# Altium footprint library PcbLib1.PcbLib: 335 footprints (part 10 of 22)
Each footprint in its own frame and in the unit in brackets; x right, y up, seen from the top. Pads: shape width x height; smd on the part's side, far side on the other; paste and mask are expansions set on the pad; w line width, h text height; cw(c..) or ccw(c..) is an arc to the next point about the centre after c.
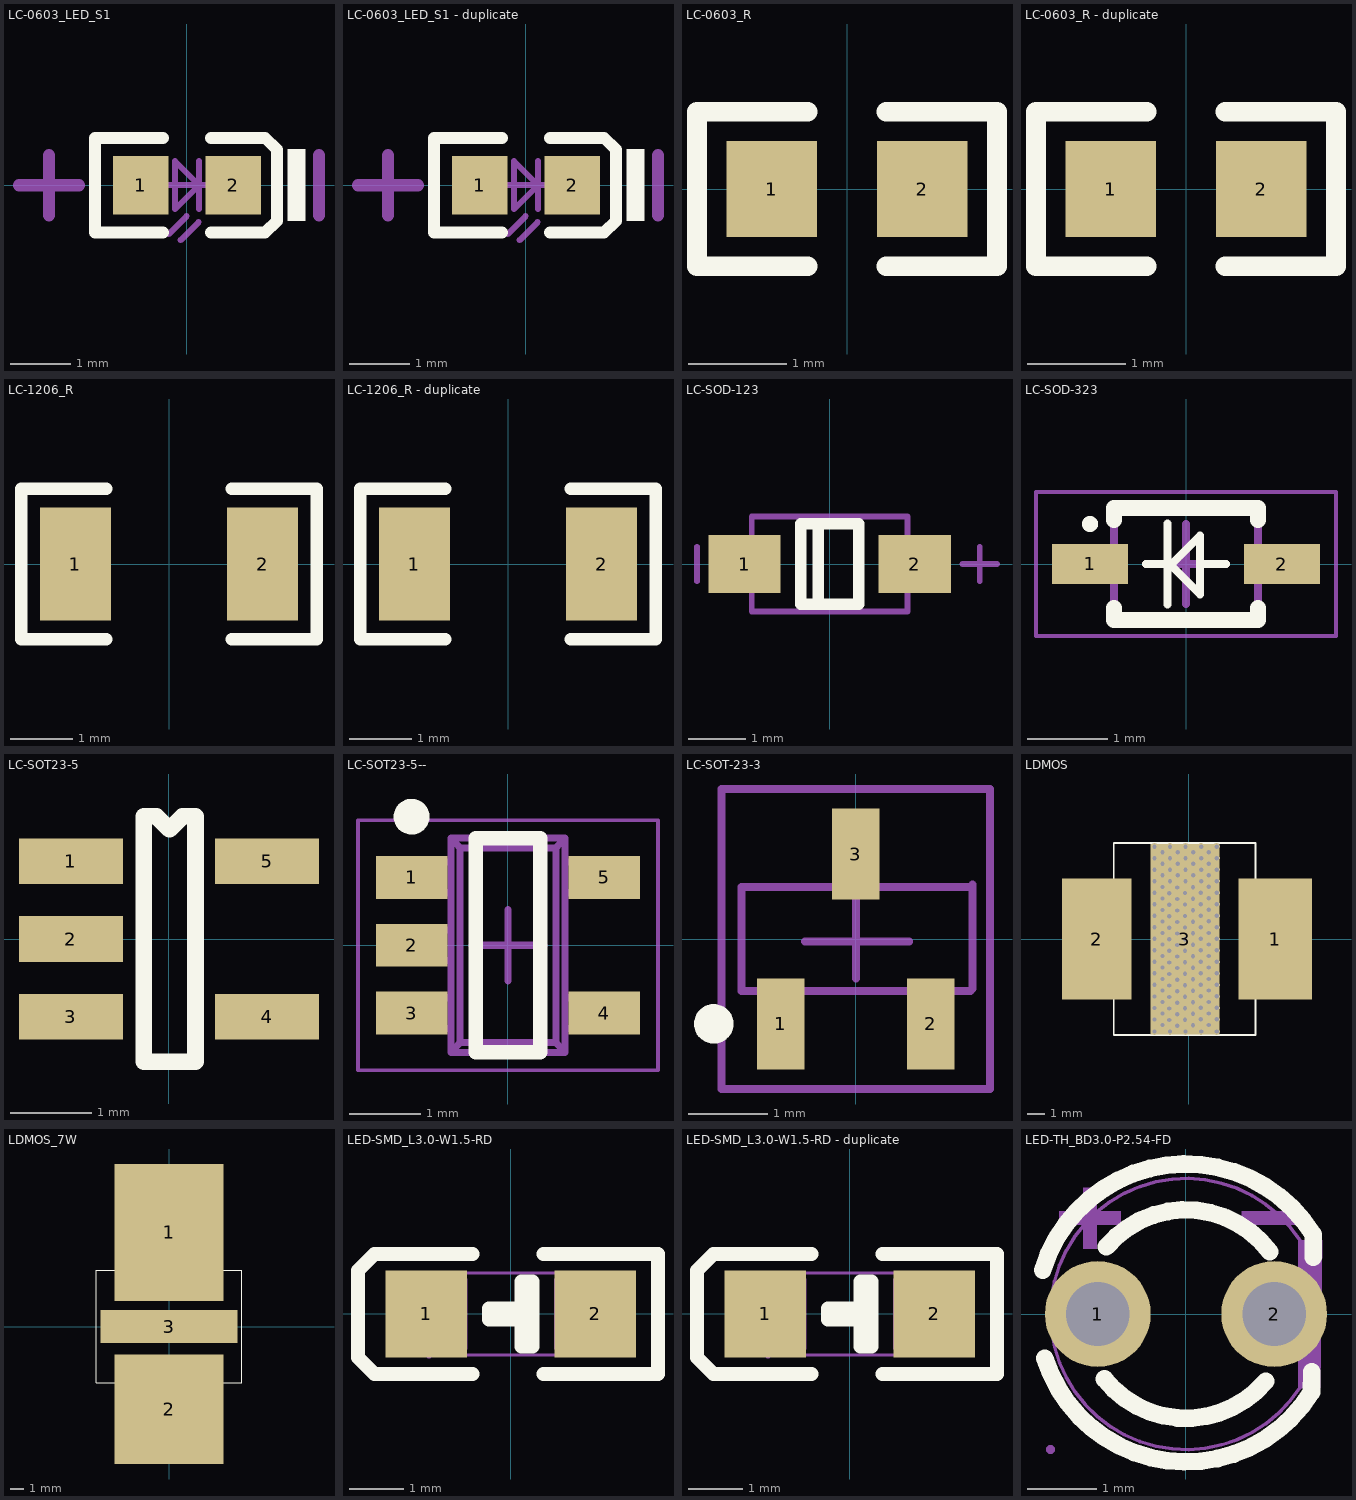
[diagram p9: the footprints below, top view; thin cyan lines are the x and y axes]

## LC-0603_LED_S1 [mm]
height 1.27
pads (2):
  rect 0.93x0.98 smd: 1(-0.77,0) 2(0.77,0)
Top Overlay:
  region: 1.975,0.6 1.675,0.6 1.675,-0.6 1.975,-0.6
  lines w0.2: -0.4,-0.79 -1.535,-0.79 -1.535,0.79 -0.4,0.79 ; 0.4,-0.79 1.3,-0.79 1.5,-0.597 1.5,0.597 1.3,0.79 0.4,0.79
Mechanical 13:
  lines w0.1: -0.4,0 0.4,0 ; -0.305,-0.817 -0.005,-0.517 ; -0.105,-0.917 0.195,-0.617 ; 0.2,-0.4 0.2,0.4 ; -0.2,-0.4 -0.2,0.4 0.2,0 -0.2,-0.4
Mechanical 15:
  lines w0.203: -2.8,0 -1.8,0 ; -2.3,-0.5 -2.3,0.5 ; 2.2,-0.5 2.2,0.5
3D body "User Library-LED_0603_R.STEP": height 0.6, standoff 0, extent -0.8,-0.4 0.8,0.4

## LC-0603_LED_S1 - duplicate [mm]
height 1.27
pads (2):
  rect 0.93x0.98 smd: 1(-0.77,0) 2(0.77,0)
Top Overlay:
  region: 1.975,0.6 1.675,0.6 1.675,-0.6 1.975,-0.6
  lines w0.2: -0.4,-0.79 -1.535,-0.79 -1.535,0.79 -0.4,0.79 ; 0.4,-0.79 1.3,-0.79 1.5,-0.597 1.5,0.597 1.3,0.79 0.4,0.79
Mechanical 13:
  lines w0.1: -0.4,0 0.4,0 ; -0.305,-0.817 -0.005,-0.517 ; -0.105,-0.917 0.195,-0.617 ; 0.2,-0.4 0.2,0.4 ; -0.2,-0.4 0.2,0 -0.2,0.4 -0.2,-0.4
Mechanical 15:
  lines w0.203: -2.8,0 -1.8,0 ; -2.3,-0.5 -2.3,0.5 ; 2.2,-0.5 2.2,0.5
3D body "User Library-LED_0603_R.STEP": height 0.6, standoff 0, extent -0.8,-0.4 0.8,0.4

## LC-0603_R [mm]
pads (2):
  rect 0.93x0.98 smd: 1(-0.77,0) 2(0.77,0)
Top Overlay:
  lines w0.2: -0.4,-0.79 -1.535,-0.79 -1.535,0.79 -0.4,0.79 ; 0.4,-0.79 1.535,-0.79 1.535,0.79 0.4,0.79
3D body "User Library-RES_1609-0603.STEP": height 0.56, standoff 0, extent -0.85,-0.4 0.85,0.4

## LC-0603_R - duplicate [mm]
pads (2):
  rect 0.93x0.98 smd: 1(-0.77,0) 2(0.77,0)
Top Overlay:
  lines w0.2: -0.4,-0.79 -1.535,-0.79 -1.535,0.79 -0.4,0.79 ; 0.4,-0.79 1.535,-0.79 1.535,0.79 0.4,0.79
3D body "User Library-RES_1609-0603.STEP": height 0.56, standoff 0, extent -0.85,-0.4 0.85,0.4

## LC-1206_R [mm]
height 1
pads (2):
  rect 1.13x1.8 smd: 1(-1.49,0) 2(1.49,0)
Top Overlay:
  lines w0.2: -1,-1.2 -2.355,-1.2 -2.355,1.2 -1,1.2 ; 1,-1.2 2.355,-1.2 2.355,1.2 1,1.2
3D body "User Library-RES_3216-1206.STEP": height 0.85, standoff 0, extent -1.7,-0.864 1.65,0.866

## LC-1206_R - duplicate [mm]
height 1
pads (2):
  rect 1.13x1.8 smd: 1(-1.49,0) 2(1.49,0)
Top Overlay:
  lines w0.2: -1,-1.2 -2.355,-1.2 -2.355,1.2 -1,1.2 ; 1,-1.2 2.355,-1.2 2.355,1.2 1,1.2
3D body "User Library-RES_3216-1206.STEP": height 0.85, standoff 0, extent -1.7,-0.864 1.65,0.866

## LC-SOD-123 [mm]
pads (2):
  rect 1.25x1 smd: 1(-1.475,0) 2(1.475,0)
Top Overlay:
  lines w0.2: -0.2,-0.7 -0.2,0.7 ; -0.5,-0.7 0.5,-0.7 0.5,0.7 -0.5,0.7 -0.5,-0.7
Mechanical 13:
  lines w0.1: -1.35,-0.825 -1.35,0.825 1.35,0.825 1.35,-0.825 -1.35,-0.825
Mechanical 15:
  lines w0.1: -2.3,-0.3 -2.3,0.3 ; 2.3,0 2.9,0 ; 2.6,-0.3 2.6,0.3
3D body "SOD123.STEP": height 1.35, standoff 0, extent -1.85,-0.775 1.85,0.775

## LC-SOD-323 [mm] "SODFL, 2-Leads, Body 1.30x2.60mm, IPC Low Density"
height 1
pads (2):
  rect 0.95x0.5 smd: 1(-1.2,0) 2(1.2,0)
Top Overlay:
  circle w0.1: c-1.2,0.5 r0.05
  lines w0.1: -0.5,0 -0.178,0 ; -0.229,-0.508 -0.229,0.508 ; 0.178,0 0.5,0 ; -0.178,0 -0.178,-0.025 0.178,-0.381 0.178,0.356 -0.178,0
  lines w0.2: -0.9,-0.55 -0.9,-0.7 0.9,-0.7 0.9,-0.55 ; -0.9,0.55 -0.9,0.7 0.9,0.7 0.9,0.55
Mechanical 13:
  lines w0.1: -0.9,-0.7 -0.9,0.7 0.9,0.7 0.9,-0.7 -0.9,-0.7
Mechanical 15:
  lines w0.05: -1.875,-0.9 -1.875,0.9 1.875,0.9 1.875,-0.9 -1.875,-0.9
  lines w0.1: -0.5,0 0.5,0 ; 0,-0.5 0,0.5
3D body "User Library-SOD323-1.STEP": height 1.1, standoff 0, extent -1.3,-0.675 1.3,0.675

## LC-SOT23-5 [mm]
height 4.5
pads (5):
  rect 1.27x0.559 smd: 1(-1.2,0.95) 2(-1.2,0) 3(-1.2,-0.95) 4(1.2,-0.95) 5(1.2,0.95)
Top Overlay:
  lines w0.203: -0.311,-1.5 0.324,-1.5 0.324,1.5 0.165,1.5 0.007,1.341 -0.152,1.5 -0.311,1.5 -0.311,-1.5
3D body "User Library-SOT23-5.STEP": height 1.09, standoff -0.01, extent -1.401,-1.449 1.399,1.45

## LC-SOT23-5-- [mm]
height 1.27
pads (5):
  rect 1x0.6 smd: 1(-1.35,0.95) 2(-1.35,0) 3(-1.35,-0.95) 4(1.35,-0.95) 5(1.35,0.95)
Top Overlay:
  circle w0.25: c-1.35,1.8 r0.125
  lines w0.2: -0.45,-1.5 0.45,-1.5 0.45,1.5 -0.45,1.5 -0.45,-1.5
Mechanical 7:
  lines w0.1: -1.138,-1.164 -1.138,-0.736 ; -1.138,-0.214 -1.138,0.214 ; -1.138,0.736 -1.138,1.164 ; -0.974,-1.164 -0.974,-0.736 ; -0.974,-0.214 -0.974,0.214 ; -0.974,0.736 -0.974,1.164 ; -0.798,-1.164 -1.49,-1.164 -1.49,-0.736 -0.798,-0.736 ; -0.798,-0.214 -1.49,-0.214 -1.49,0.214 -0.798,0.214 ; -0.798,0.736 -1.49,0.736 -1.49,1.164 -0.798,1.164 ; 0.798,-1.164 1.49,-1.164 1.49,-0.736 0.798,-0.736 ; 0.798,0.736 1.49,0.736 1.49,1.164 0.798,1.164 ; 0.974,-1.164 0.974,-0.736 ; 0.974,0.736 0.974,1.164 ; 1.138,-1.164 1.138,-0.736 ; 1.138,0.736 1.138,1.164 ; -0.798,-1.5 -0.67,-1.361 ; -0.798,-1.5 -0.798,1.5 ; -0.798,-1.5 0.798,-1.5 ; -0.798,1.5 -0.67,1.361 ; -0.798,1.5 0.798,1.5 ; -0.67,-1.361 -0.67,1.361 ; -0.67,-1.361 0.67,-1.361 ; -0.67,1.361 0.67,1.361 ; 0.67,-1.361 0.798,-1.5 ; 0.67,-1.361 0.67,1.361 ; 0.67,1.361 0.798,1.5 ; 0.798,-1.5 0.798,1.5
Mechanical 15:
  lines w0.05: -2.1,-1.75 -2.1,1.75 2.1,1.75 2.1,-1.75 -2.1,-1.75
  lines w0.1: -0.5,0 0.5,0 ; 0,-0.5 0,0.5
3D body "SOT95P275X140-5N.step": height 1.4, standoff 0, extent -1.5,-1.55 1.5,1.55

## LC-SOT-23-3 [mm] "SOT23, 3-Leads, Body 2.9x2"
height 1
pads (3):
  rect 0.6x1.15 smd: 1(-0.95,-1.075) 2(0.95,-1.075) 3(0,1.075)
Top Overlay:
  circle w0.25: c-1.8,-1.075 r0.125
Mechanical 13:
  lines w0.1: 1.45,-0.66 -1.45,-0.66 -1.45,0.66 1.45,0.66 ; 1.477,-0.63 1.477,0.69
Mechanical 15:
  lines w0.1: -0.647,-0.03 0.677,-0.03 ; 0,-0.5 0,0.5 ; -1.7,-1.9 1.7,-1.9 1.7,1.9 -1.7,1.9 -1.7,-1.9
3D body "SW3DPS-SOT-23-DEFAULT.STEP": height 1.08, standoff -0.02, extent -1.499,-1.288 1.501,1.212

## LDMOS [mm]
pads (3):
  rect 4.25x7 smd mask+0: 1(4.994,0.007)
  rect 4x7 smd mask+0: 2(-5.328,0.007)
  rect 4x11 smd mask+0: 3(-0.228,0.007)
via 1.601,-5.329 diameter 0.4 hole 0.25
via 1.601,3.35 diameter 0.4 hole 0.25
via -1.985,3.35 diameter 0.4 hole 0.25
via -0.192,3.35 diameter 0.4 hole 0.25
via -1.088,3.35 diameter 0.4 hole 0.25
via -1.985,-5.329 diameter 0.4 hole 0.25
via -0.192,-5.329 diameter 0.4 hole 0.25
via 0.705,-5.329 diameter 0.4 hole 0.25
via -1.088,-5.329 diameter 0.4 hole 0.25
via 1.138,3.686 diameter 0.4 hole 0.25
via -1.523,3.686 diameter 0.4 hole 0.25
via -0.636,3.686 diameter 0.4 hole 0.25
via 0.251,3.686 diameter 0.4 hole 0.25
via 0.251,4.35 diameter 0.4 hole 0.25
via -1.523,4.35 diameter 0.4 hole 0.25
via 1.138,4.35 diameter 0.4 hole 0.25
via 1.138,5.015 diameter 0.4 hole 0.25
via -1.523,5.015 diameter 0.4 hole 0.25
via 0.251,5.015 diameter 0.4 hole 0.25
via -0.636,5.015 diameter 0.4 hole 0.25
via -1.985,5.344 diameter 0.4 hole 0.25
via -1.985,-4.633 diameter 0.4 hole 0.25
via -1.985,-3.968 diameter 0.4 hole 0.25
via -1.985,-3.304 diameter 0.4 hole 0.25
via -1.985,-2.639 diameter 0.4 hole 0.25
via -1.985,-1.974 diameter 0.4 hole 0.25
via -1.985,-1.309 diameter 0.4 hole 0.25
via -1.985,-0.645 diameter 0.4 hole 0.25
via -1.985,0.02 diameter 0.4 hole 0.25
via -1.985,0.685 diameter 0.4 hole 0.25
via -1.985,1.35 diameter 0.4 hole 0.25
via -1.985,2.015 diameter 0.4 hole 0.25
via -1.985,2.679 diameter 0.4 hole 0.25
via -1.985,4.014 diameter 0.4 hole 0.25
via -1.985,4.679 diameter 0.4 hole 0.25
via -1.523,-4.958 diameter 0.4 hole 0.25
via -1.523,-4.294 diameter 0.4 hole 0.25
via -1.523,-3.629 diameter 0.4 hole 0.25
via -1.523,-2.965 diameter 0.4 hole 0.25
via -1.523,-2.3 diameter 0.4 hole 0.25
via -1.523,-1.636 diameter 0.4 hole 0.25
via -1.523,-0.971 diameter 0.4 hole 0.25
via -1.523,-0.307 diameter 0.4 hole 0.25
via -1.523,0.358 diameter 0.4 hole 0.25
via -1.523,1.022 diameter 0.4 hole 0.25
via -1.523,1.687 diameter 0.4 hole 0.25
via -1.523,2.351 diameter 0.4 hole 0.25
via -1.523,3.016 diameter 0.4 hole 0.25
via -1.088,5.344 diameter 0.4 hole 0.25
via -1.136,-4.664 diameter 0.4 hole 0.25
via -1.136,-4 diameter 0.4 hole 0.25
via -1.136,-3.335 diameter 0.4 hole 0.25
via -1.136,-2.67 diameter 0.4 hole 0.25
via -1.136,-2.005 diameter 0.4 hole 0.25
via -1.136,-1.34 diameter 0.4 hole 0.25
via -1.136,-0.676 diameter 0.4 hole 0.25
via -1.136,-0.011 diameter 0.4 hole 0.25
via -1.136,0.654 diameter 0.4 hole 0.25
via -1.136,1.319 diameter 0.4 hole 0.25
via -1.136,1.983 diameter 0.4 hole 0.25
via -1.136,2.648 diameter 0.4 hole 0.25
via -1.088,4.014 diameter 0.4 hole 0.25
via -1.088,4.679 diameter 0.4 hole 0.25
via -0.674,-4.989 diameter 0.4 hole 0.25
via -0.674,-4.325 diameter 0.4 hole 0.25
via -0.674,-3.66 diameter 0.4 hole 0.25
via -0.674,-2.996 diameter 0.4 hole 0.25
via -0.674,-2.331 diameter 0.4 hole 0.25
via -0.674,-1.667 diameter 0.4 hole 0.25
via -0.674,-1.002 diameter 0.4 hole 0.25
via -0.674,-0.338 diameter 0.4 hole 0.25
via -0.674,0.327 diameter 0.4 hole 0.25
via -0.674,0.991 diameter 0.4 hole 0.25
via -0.674,1.656 diameter 0.4 hole 0.25
via -0.674,2.32 diameter 0.4 hole 0.25
via -0.674,2.985 diameter 0.4 hole 0.25
via -0.636,4.35 diameter 0.4 hole 0.25
via -0.192,5.344 diameter 0.4 hole 0.25
via -0.228,-4.646 diameter 0.4 hole 0.25
via -0.228,-3.982 diameter 0.4 hole 0.25
via -0.228,-3.317 diameter 0.4 hole 0.25
via -0.228,-2.652 diameter 0.4 hole 0.25
via -0.228,-1.987 diameter 0.4 hole 0.25
via -0.228,-1.323 diameter 0.4 hole 0.25
via -0.228,-0.658 diameter 0.4 hole 0.25
via -0.228,0.007 diameter 0.4 hole 0.25
via -0.228,0.672 diameter 0.4 hole 0.25
via -0.228,1.336 diameter 0.4 hole 0.25
via -0.228,2.001 diameter 0.4 hole 0.25
via -0.228,2.666 diameter 0.4 hole 0.25
via -0.192,4.014 diameter 0.4 hole 0.25
via -0.192,4.679 diameter 0.4 hole 0.25
via 0.233,-4.971 diameter 0.4 hole 0.25
via 0.233,-4.307 diameter 0.4 hole 0.25
via 0.233,-3.642 diameter 0.4 hole 0.25
via 0.233,-2.978 diameter 0.4 hole 0.25
via 0.233,-2.313 diameter 0.4 hole 0.25
via 0.233,-1.649 diameter 0.4 hole 0.25
via 0.233,-0.984 diameter 0.4 hole 0.25
via 0.233,-0.32 diameter 0.4 hole 0.25
via 0.233,0.345 diameter 0.4 hole 0.25
via 0.233,1.009 diameter 0.4 hole 0.25
via 0.233,1.674 diameter 0.4 hole 0.25
via 0.233,2.338 diameter 0.4 hole 0.25
via 0.233,3.003 diameter 0.4 hole 0.25
via 1.601,5.344 diameter 0.4 hole 0.25
via 0.705,5.344 diameter 0.4 hole 0.25
via 0.676,-4.628 diameter 0.4 hole 0.25
via 0.676,-3.963 diameter 0.4 hole 0.25
via 0.676,-3.298 diameter 0.4 hole 0.25
via 0.676,-2.633 diameter 0.4 hole 0.25
via 0.676,-1.968 diameter 0.4 hole 0.25
via 0.676,-1.304 diameter 0.4 hole 0.25
via 0.676,-0.639 diameter 0.4 hole 0.25
via 0.676,0.026 diameter 0.4 hole 0.25
via 0.676,0.691 diameter 0.4 hole 0.25
via 0.676,1.355 diameter 0.4 hole 0.25
via 0.676,2.02 diameter 0.4 hole 0.25
via 0.676,2.685 diameter 0.4 hole 0.25
via 0.705,3.35 diameter 0.4 hole 0.25
via 0.705,4.014 diameter 0.4 hole 0.25
via 0.705,4.679 diameter 0.4 hole 0.25
via 1.138,-4.953 diameter 0.4 hole 0.25
via 1.138,-4.288 diameter 0.4 hole 0.25
via 1.138,-3.624 diameter 0.4 hole 0.25
via 1.138,-2.959 diameter 0.4 hole 0.25
via 1.138,-2.295 diameter 0.4 hole 0.25
via 1.138,-1.63 diameter 0.4 hole 0.25
via 1.138,-0.966 diameter 0.4 hole 0.25
via 1.138,-0.301 diameter 0.4 hole 0.25
via 1.138,0.363 diameter 0.4 hole 0.25
via 1.138,1.028 diameter 0.4 hole 0.25
via 1.138,1.692 diameter 0.4 hole 0.25
via 1.138,2.357 diameter 0.4 hole 0.25
via 1.138,3.021 diameter 0.4 hole 0.25
via 1.601,-4.628 diameter 0.4 hole 0.25
via 1.601,-3.963 diameter 0.4 hole 0.25
via 1.601,-3.299 diameter 0.4 hole 0.25
via 1.601,-2.634 diameter 0.4 hole 0.25
via 1.601,-1.97 diameter 0.4 hole 0.25
via 1.601,-1.305 diameter 0.4 hole 0.25
via 1.601,-0.641 diameter 0.4 hole 0.25
via 1.601,0.024 diameter 0.4 hole 0.25
via 1.601,0.688 diameter 0.4 hole 0.25
via 1.601,1.353 diameter 0.4 hole 0.25
via 1.601,2.017 diameter 0.4 hole 0.25
via 1.601,2.682 diameter 0.4 hole 0.25
via 1.601,4.014 diameter 0.4 hole 0.25
via 1.601,4.679 diameter 0.4 hole 0.25
Top Overlay:
  lines w0.1: -4.334,5.543 -4.334,-5.527 -2.042,-5.527 ; -4.334,5.552 3.847,5.552 ; 3.847,5.543 3.847,-5.527 1.236,-5.527 -2.042,-5.527 ; -2.042,-5.527 -2.042,-5.527
Top Solder:
  lines w0.01: -2.306,3.748 -2.304,-3.726 -1.395,-3.724 ; 0.699,-3.73 1.599,-3.729 1.598,3.742 0.698,3.747

## LDMOS_7W [mm]
pads (3):
  rect 8x10 smd mask+0.051: 1(0,6.881)
  rect 8x8 smd mask+0.051: 2(0,-6.05)
  rect 10x2.43 smd mask+0.051: 3(0,0)
Top Overlay:
  lines w0.01: -5.334,-4.1 -5.334,4.1 ; -5.325,-4.1 5.325,-4.1 ; -5.325,4.1 5.325,4.1 ; 5.334,-4.1 5.334,4.1

## LED-SMD_L3.0-W1.5-RD [mm]
pads (2):
  rect 1.5x1.6 smd mask+0.051: 1(-1.55,0) 2(1.55,0)
Top Overlay:
  lines w0.254: -0.7,-1.1 -2.5,-1.1 -2.8,-0.8 -2.8,0.8 -2.5,1.1 -0.7,1.1 ; 0.6,-1.1 2.7,-1.1 2.7,1.1 2.6,1.1 0.6,1.1 ; -0.4,-0.1 0.4,-0.1 0.4,0.1 -0.4,0.1 -0.4,-0.1 ; 0.2,-0.6 0.4,-0.6 0.4,0.6 0.2,0.6 0.2,-0.6
Mechanical 6:
  region: 0.9,-0.1 0.9,0.1 2.1,0.1 2.1,-0.1 0.9,-0.1
  region: 1.65,-0.65 1.45,-0.65 1.45,0.55 1.65,0.55 1.65,-0.65
  region: -2.2,-0.1 -2.2,0.1 -1,0.1 -1,-0.1 -2.2,-0.1
Mechanical 15:
  region: -1.44,-0.75 -1.44,-0.725 -1.475,-0.69 -1.525,-0.69 -1.56,-0.725 -1.56,-0.75 -1.56,-0.775 -1.525,-0.81 -1.475,-0.81 -1.44,-0.775 -1.44,-0.75
  region: 0.8,-0.65 0.8,0.65 1.5,0.65 1.5,-0.65
  region: -1.5,-0.65 -1.5,0.65 -0.8,0.65 -0.8,-0.65
  lines w0.051: -1.5,-0.75 1.5,-0.75 1.5,0.75 -1.5,0.75 -1.5,-0.75

## LED-SMD_L3.0-W1.5-RD - duplicate [mm]
pads (2):
  rect 1.5x1.6 smd mask+0.051: 1(-1.55,0) 2(1.55,0)
Top Overlay:
  lines w0.254: -0.7,-1.1 -2.5,-1.1 -2.8,-0.8 -2.8,0.8 -2.5,1.1 -0.7,1.1 ; 0.6,-1.1 2.7,-1.1 2.7,1.1 2.6,1.1 0.6,1.1 ; -0.4,-0.1 -0.4,0.1 0.4,0.1 0.4,-0.1 -0.4,-0.1 ; 0.2,-0.6 0.2,0.6 0.4,0.6 0.4,-0.6 0.2,-0.6
Mechanical 6:
  region: -2.2,-0.1 -2.2,0.1 -1,0.1 -1,-0.1 -2.2,-0.1
  region: 1.65,-0.65 1.45,-0.65 1.45,0.55 1.65,0.55 1.65,-0.65
  region: 0.9,-0.1 0.9,0.1 2.1,0.1 2.1,-0.1 0.9,-0.1
Mechanical 15:
  region: -1.5,-0.65 -1.5,0.65 -0.8,0.65 -0.8,-0.65
  region: 0.8,-0.65 0.8,0.65 1.5,0.65 1.5,-0.65
  region: -1.44,-0.75 -1.44,-0.725 -1.475,-0.69 -1.525,-0.69 -1.56,-0.725 -1.56,-0.75 -1.56,-0.775 -1.525,-0.81 -1.475,-0.81 -1.44,-0.775 -1.44,-0.75
  lines w0.051: -1.5,-0.75 -1.5,0.75 1.5,0.75 1.5,-0.75 -1.5,-0.75

## LED-TH_BD3.0-P2.54-FD [mil]
pads (2):
  round 60 hole 36 paste-99999 mask+2: 1(-50,0) 2(50,0)
Top Overlay:
  lines w10: -81.26,24.92 cw(c0,0) 72.07,45.07 72.06,32.26 ; -80,-25 ccw(c0,0) 71.08,-44.42 71.23,-32.82 ; -46.19,-36.85 ccw(c0,0) 45.22,-38.03 ; -45.12,38.07 cw(c0,0) 47.36,35.24
Mechanical 6:
  region: 64.57,41.73 64.57,-41.73 75.98,-41.73 75.98,-41.34 77.17,41.73
  region: -37.11,58.11 -71.75,58.11 -71.75,50.63 -37.11,50.63
  region: -58.16,71.67 -58.16,37.03 -50.68,37.03 -50.68,71.67
  region: 66.14,58.11 31.5,58.11 31.5,50.63 66.14,50.63
Mechanical 15:
  region: 40.16,9.84 59.84,9.84 59.84,-9.84 40.16,-9.84
  region: -59.84,9.84 -40.16,9.84 -40.16,-9.84 -59.84,-9.84
  region: -74.43,-76.85 -74.43,-75.88 -75.82,-74.49 -77.77,-74.49 -79.16,-75.88 -79.16,-76.85 -79.16,-77.83 -77.77,-79.22 -75.82,-79.22 -74.43,-77.83 -74.43,-76.85
  lines w2: 64.57,41.73 ccw(c0.05,-0.01) 64.6,-41.7 64.57,41.73